# Altium footprint library Altium_Lib_Haris.PcbLib: 85 footprints (part 5 of 6)
Each footprint in its own frame and in the unit in brackets; x right, y up, seen from the top. Pads: shape width x height; smd on the part's side, far side on the other; paste and mask are expansions set on the pad; w line width, h text height; cw(c..) or ccw(c..) is an arc to the next point about the centre after c.
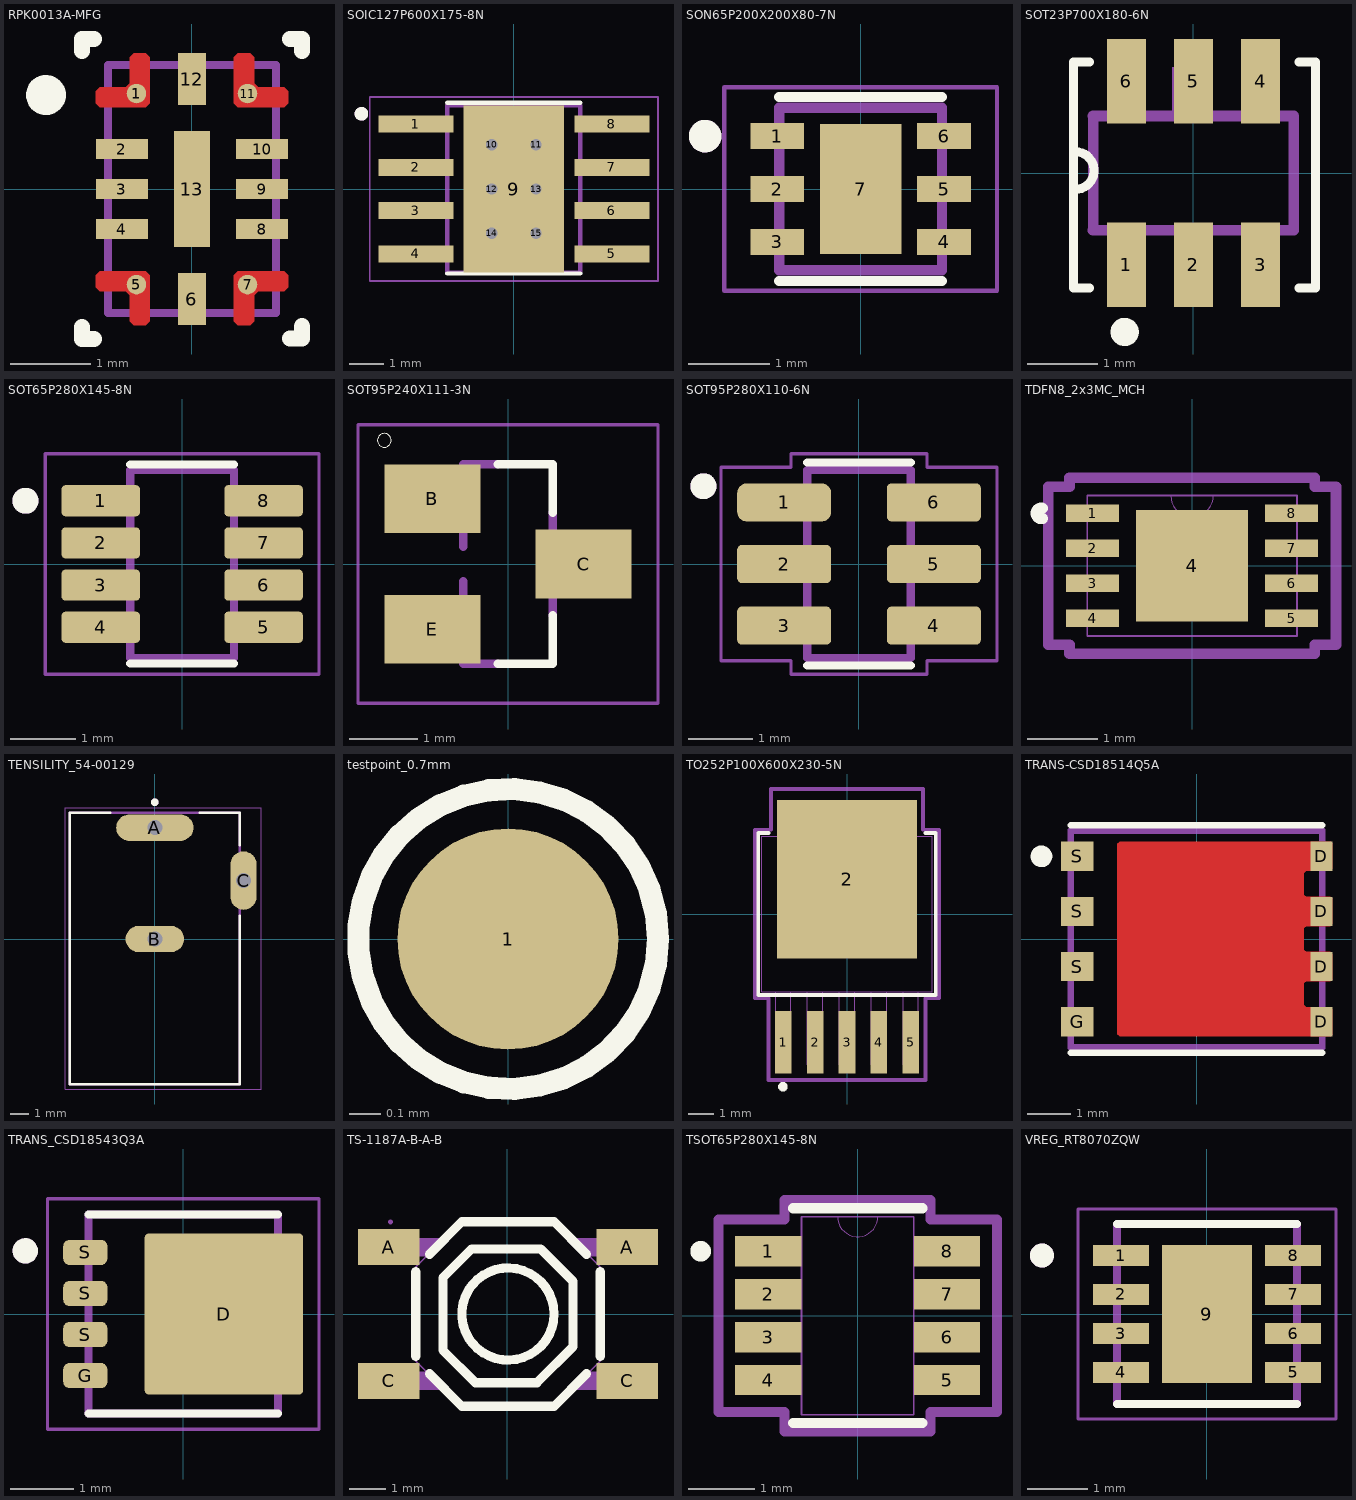
[diagram p4: the footprints below, top view; thin cyan lines are the x and y axes]

## RPK0013A-MFG [mm]
pads (13):
  round 0.244 smd paste+0 mask+0: 1(-0.694,1.194) 5(-0.694,-1.194) 7(0.694,-1.194) 11(0.694,1.194)
  rect 0.65x0.25 smd paste+0 mask+0: 2(-0.875,0.5) 3(-0.875,0) 4(-0.875,-0.5) 8(0.875,-0.5) 9(0.875,0) 10(0.875,0.5)
  rect 0.35x0.65 smd paste+0 mask+0: 6(0,-1.375) 12(0,1.375)
  rect 0.45x1.45 smd paste+0 mask+0: 13(0,0)
Top Layer:
  region: 0.575,1.7 0.725,1.7 0.775,1.65 0.775,1.325 0.825,1.275 1.15,1.275 1.2,1.225 1.2,1.075 1.15,1.025 0.575,1.025 0.525,1.075 0.525,1.65
  region: -0.575,-1.7 -0.725,-1.7 -0.775,-1.65 -0.775,-1.325 -0.825,-1.275 -1.15,-1.275 -1.2,-1.225 -1.2,-1.075 -1.15,-1.025 -0.575,-1.025 -0.525,-1.075 -0.525,-1.65
  region: 1.2,-1.075 1.2,-1.225 1.15,-1.275 0.825,-1.275 0.775,-1.325 0.775,-1.65 0.725,-1.7 0.575,-1.7 0.525,-1.65 0.525,-1.075 0.575,-1.025 1.15,-1.025
  region: -1.2,1.075 -1.2,1.225 -1.15,1.275 -0.825,1.275 -0.775,1.325 -0.775,1.65 -0.725,1.7 -0.575,1.7 -0.525,1.65 -0.525,1.075 -0.575,1.025 -1.15,1.025
Top Overlay:
  circle w0.25: c-1.825,1.175 r0.125
  lines w0.2: -1.373,-1.724 -1.373,-1.874 -1.223,-1.874 ; -1.373,1.724 -1.373,1.874 -1.223,1.874 ; 1.225,-1.865 1.375,-1.865 1.375,-1.715 ; 1.225,1.875 1.375,1.875 1.375,1.725
Top Paste:
  region: 0.575,1.7 0.725,1.7 0.775,1.65 0.775,1.325 0.825,1.275 1.15,1.275 1.2,1.225 1.2,1.075 1.15,1.025 0.575,1.025 0.525,1.075 0.525,1.65
  region: -0.575,-1.7 -0.725,-1.7 -0.775,-1.65 -0.775,-1.325 -0.825,-1.275 -1.15,-1.275 -1.2,-1.225 -1.2,-1.075 -1.15,-1.025 -0.575,-1.025 -0.525,-1.075 -0.525,-1.65
  region: 1.2,-1.075 1.2,-1.225 1.15,-1.275 0.825,-1.275 0.775,-1.325 0.775,-1.65 0.725,-1.7 0.575,-1.7 0.525,-1.65 0.525,-1.075 0.575,-1.025 1.15,-1.025
  region: -1.2,1.075 -1.2,1.225 -1.15,1.275 -0.825,1.275 -0.775,1.325 -0.775,1.65 -0.725,1.7 -0.575,1.7 -0.525,1.65 -0.525,1.075 -0.575,1.025 -1.15,1.025
Top Solder:
  region: 0.575,1.7 0.725,1.7 0.775,1.65 0.775,1.325 0.825,1.275 1.15,1.275 1.2,1.225 1.2,1.075 1.15,1.025 0.575,1.025 0.525,1.075 0.525,1.65
  region: -0.575,-1.7 -0.725,-1.7 -0.775,-1.65 -0.775,-1.325 -0.825,-1.275 -1.15,-1.275 -1.2,-1.225 -1.2,-1.075 -1.15,-1.025 -0.575,-1.025 -0.525,-1.075 -0.525,-1.65
  region: 1.2,-1.075 1.2,-1.225 1.15,-1.275 0.825,-1.275 0.775,-1.325 0.775,-1.65 0.725,-1.7 0.575,-1.7 0.525,-1.65 0.525,-1.075 0.575,-1.025 1.15,-1.025
  region: -1.2,1.075 -1.2,1.225 -1.15,1.275 -0.825,1.275 -0.775,1.325 -0.775,1.65 -0.725,1.7 -0.575,1.7 -0.525,1.65 -0.525,1.075 -0.575,1.025 -1.15,1.025
Mechanical 13:
  lines w0.1: -1.05,-1.55 1.05,-1.55 1.05,1.55 -1.05,1.55 -1.05,-1.55
3D body "RPK0013A.stp": height 0.65, standoff 0, extent -1,-1.5 1,1.5

## SOIC127P600X175-8N [mm]
height 1.7
pads (15):
  rect 2.2x0.5 smd paste-0.025 mask+0.07: 1(-2.875,1.905) 2(-2.875,0.635) 3(-2.875,-0.635) 4(-2.875,-1.905) 8(2.875,1.905)
  rect 2.2x0.5 smd mask+0.07: 5(2.875,-1.905) 6(2.875,-0.635)
  rect 2.2x0.5 smd paste+0 mask+0.07: 7(2.875,0.635)
  rect 2.95x4.9 smd paste-3 mask+0: 9(0,0)
  round 0.43 hole 0.33 mask+0: 10(-0.65,1.3) 11(0.65,1.3) 12(-0.65,0) 13(0.65,0) 14(-0.65,-1.3) 15(0.65,-1.3)
Top Overlay:
  circle w0.2: c-4.47,2.205 r0.1
  lines w0.127: -1.95,-2.475 1.95,-2.475 ; -1.95,2.525 1.95,2.525
Top Paste:
  region: 1.2,-1.55 -1.2,-1.55 -1.2,1.55 1.2,1.55
Top Solder:
  region: 1.2,-1.55 -1.2,-1.55 -1.2,1.55 1.2,1.55
Mechanical 13:
  circle w0.2: c-4.47,2.205 r0.1
  lines w0.127: -1.95,-2.45 1.95,-2.45 1.95,2.45 -1.95,2.45 -1.95,-2.45
Mechanical 15:
  lines w0.05: -4.225,-2.7 4.225,-2.7 4.225,2.7 -4.225,2.7 -4.225,-2.7
3D body "step_temp.STEP": height 1.7, standoff 0, extent -3,-2.45 3,2.45

## SON65P200X200X80-7N [mm]
pads (7):
  rect 0.66x0.32 smd: 1(-1.025,0.65) 2(-1.025,0) 3(-1.025,-0.65) 4(1.025,-0.65) 5(1.025,0) 6(1.025,0.65)
  rect 1x1.6 smd paste-2: 7(0,0)
Top Overlay:
  circle w0.2: c-1.91,0.65 r0.1
  lines w0.127: -1,-1.13 1,-1.13 ; -1,1.13 1,1.13
Top Paste:
  region: 0.316,-0.506 -0.316,-0.506 -0.316,0.506 0.316,0.506
Mechanical 13:
  circle w0.2: c-1.91,0.65 r0.1
  lines w0.127: -1,-1 -1,1 1,1 1,-1 -1,-1
Mechanical 15:
  lines w0.05: -1.675,-1.25 -1.675,1.25 1.675,1.25 1.675,-1.25 -1.675,-1.25
3D body "step_temp.STEP": height 0.8, standoff 0, extent -1,-1 1,1

## SOT23P700X180-6N [mm]
pads (6):
  rect 0.55x1.2 smd: 1(-0.95,-1.3) 2(0,-1.3) 3(0.95,-1.3) 4(0.95,1.3) 5(0,1.3) 6(-0.95,1.3)
Top Overlay:
  circle w0.2: c-0.975,-2.25 r0.1
  lines w0.127: -1.675,-0.231 ccw(c-1.675,0.036) -1.675,0.303 ; -1.474,-1.625 -1.7,-1.625 -1.7,1.575 -1.474,1.575 ; 1.498,-1.625 1.729,-1.625 1.729,1.575 1.498,1.575
Mechanical 13:
  region: 0.2,0.85 -0.3,0.85 -0.3,1.5 0.2,1.5
  region: -0.7,0.85 -1.2,0.85 -1.2,1.5 -0.7,1.5
  region: 1.2,0.85 0.7,0.85 0.7,1.5 1.2,1.5
  region: 1.2,-1.5 0.7,-1.5 0.7,-0.85 1.2,-0.85
  region: 0.25,-1.5 -0.25,-1.5 -0.25,-0.85 0.25,-0.85
  region: -0.7,-1.5 -1.2,-1.5 -1.2,-0.85 -0.7,-0.85
  lines w0.152: -1.422,-0.81 -1.422,0.81 1.422,0.81 1.422,-0.81 -1.422,-0.81
3D body "step_temp.STEP": height 1.45, standoff 0, extent -1.45,-1.4 1.45,1.4

## SOT65P280X145-8N [mm]
pads (8):
  rrect25% 1.21x0.48 smd: 1(-1.255,0.975) 2(-1.255,0.325) 3(-1.255,-0.325) 4(-1.255,-0.975) 5(1.255,-0.975) 6(1.255,-0.325) 7(1.255,0.325) 8(1.255,0.975)
Top Overlay:
  circle w0.2: c-2.415,0.975 r0.1
  lines w0.127: -0.8,-1.535 0.8,-1.535 ; -0.8,1.535 0.8,1.535
Mechanical 13:
  circle w0.2: c-2.415,0.975 r0.1
  lines w0.127: -0.8,-1.45 0.8,-1.45 0.8,1.45 -0.8,1.45 -0.8,-1.45
Mechanical 15:
  lines w0.05: -2.11,-1.7 2.11,-1.7 2.11,1.7 -2.11,1.7 -2.11,-1.7
3D body "step_temp.STEP": height 1.45, standoff 0, extent -1.4,-1.45 1.4,1.45

## SOT95P240X111-3N [mm]
pads (3):
  rect 1.4x1 smd: B(-1.1,0.95) C(1.1,0) E(-1.1,-0.95)
Top Overlay:
  circle w0: c-1.8,1.8 r0.1
  lines w0.127: -0.15,-1.45 0.65,-1.45 0.65,-0.75 ; -0.15,1.45 0.65,1.45 0.65,0.75
Mechanical 13:
  region: 1.296,-0.228 0.711,-0.228 0.711,0.228 1.296,0.228
  region: -0.711,-1.169 -1.296,-1.169 -1.296,-0.711 -0.711,-0.711
  region: -0.713,0.711 -1.296,0.711 -1.296,1.17 -0.713,1.17
  lines w0.127: -0.65,-0.25 -0.65,-1.45 -0.15,-1.45 ; -0.65,0.25 -0.65,1.45 -0.15,1.45 ; 0.65,-0.75 0.65,0.75
Mechanical 15:
  lines w0.051: -2.183,-2.023 -2.183,2.023 2.183,2.023 2.183,-2.023 -2.183,-2.023
3D body "step_temp.STEP": height 1.11, standoff 0, extent -1.2,-1.45 1.2,1.45

## SOT95P280X110-6N [mm]
pads (6):
  rrect50% 1.45x0.59 smd: 1(-1.155,0.95)
  rrect25% 1.45x0.59 smd: 2(-1.155,0) 3(-1.155,-0.95) 4(1.155,-0.95) 5(1.155,0) 6(1.155,0.95)
Top Overlay:
  circle w0.2: c-2.4,1.2 r0.1
  lines w0.127: -0.8,-1.565 0.8,-1.565 ; -0.8,1.565 0.8,1.565
Mechanical 13:
  circle w0.2: c-2.4,1.2 r0.1
  lines w0.127: -0.8,-1.45 0.8,-1.45 0.8,1.45 -0.8,1.45 -0.8,-1.45
Mechanical 15:
  lines w0.05: -2.13,-1.495 -1.05,-1.495 -1.05,-1.7 1.05,-1.7 1.05,-1.495 2.13,-1.495 2.13,1.495 1.05,1.495 1.05,1.7 -1.05,1.7 -1.05,1.495 -2.13,1.495 -2.13,-1.495
3D body "step_temp.STEP": height 1.1, standoff 0, extent -1.4,-1.45 1.4,1.45

## TDFN8_2x3MC_MCH [mil]
pads (9):
  rect 30x10 smd paste+0 mask+0: 1(-56,29.53) 2(-56,9.84) 3(-56,-9.84) 4(-56,-29.53) 5(56,-29.53) 6(56,-9.84) 7(56,9.84) 8(56,29.53)
  rect 63x63 smd paste+0 mask+0: 4(0,0)
Top Overlay:
  lines w6: -84.1,26.62 cw(c-84.84,29.53) -84.1,32.43
Mechanical 13:
  lines w0: -12,39.5 ccw(c0,39.5) 12,39.5
  lines w1: -59,-39.5 -59,39.5 59,39.5 59,-39.5 -59,-39.5
Mechanical 15:
  lines w6: -81,-44.53 -69,-44.53 -69,-49.5 69,-49.5 69,-44.53 81,-44.53 81,44.53 69,44.53 69,49.5 -69,49.5 -69,44.53 -81,44.53 -81,-44.53
3D body "TDFN8_2x3MC_MCH.step": height 30.12, standoff 0, extent -59.02,-39.49 59.02,39.49

## TENSILITY_54-00129 [mm]
height 10.8
pads (3):
  oval 4.1x1.4 hole 0.8 square mask+0.05: A(0,5.9)
  oval 3.1x1.4 hole 0.8 square mask+0.05: B(0,0)
  oval 1.4x3.1 hole 0.8 square mask+0.05: C(4.7,3.1)
Top Overlay:
  circle w0.2: c0,7.25 r0.1
  lines w0.127: -2.37,6.7 -4.5,6.7 -4.5,-7.7 4.5,-7.7 4.5,1.23 ; 2.37,6.7 4.5,6.7 4.5,4.97
Mechanical 13:
  circle w0.2: c0,7.25 r0.1
  lines w0.127: -4.5,-7.7 -4.5,6.7 4.5,6.7 4.5,-7.7 -4.5,-7.7
Mechanical 15:
  lines w0.05: -4.75,-7.95 5.65,-7.95 5.65,6.95 -4.75,6.95 -4.75,-7.95
3D body "step_temp.STEP": height 10.8, standoff -3.7, extent -4.5,-7.7 4.88,6.7

## testpoint_0.7mm [mm]
pads (1):
  round 0.7 smd: 1(0,0)
Top Overlay:
  circle w0.07: c0,0 r0.475

## TO252P100X600X230-5N [mil]
pads (6):
  rect 26x98 smd paste+0 mask+0: 1(-100,-201) 2(-50,-201) 3(0,-201) 4(50,-201) 5(100,-201)
  rect 220x249 smd paste+0 mask+0: 2(0,54.5)
Top Overlay:
  circle w7.87: c-100.39,-270.67 r3.55
  lines w6: -123.1,127 -139,127 -139,-127 139,-127 139,127 123.1,127
Mechanical 13:
  lines w1: -134,-122 -134,122 134,122 134,-122 -134,-122 ; -112,-236 -88,-236 -88,-122 -112,-122 -112,-236 ; -62,-236 -38,-236 -38,-122 -62,-122 -62,-236 ; -12,-236 12,-236 12,-122 -12,-122 -12,-236 ; 38,-236 62,-236 62,-122 38,-122 38,-236 ; 88,-236 112,-236 112,-122 88,-122 88,-236
Mechanical 15:
  lines w6: -144,-132 -123,-132 -123,-260 123,-260 123,-132 144,-132 144,132 119,132 119,196 -119,196 -119,132 -144,132 -144,-132
3D body "PE-TO-252-5-P2-180329_NMD.step": height 103.11, standoff -2.01, extent -134.02,-235.98 134.02,165

## TRANS-CSD18514Q5A [mm]
pads (8):
  rect 0.505x0.675 smd paste+0 mask-0.33: D(2.875,-1.905) D(2.875,-0.635) D(2.875,0.635) D(2.875,1.905)
  rect 0.75x0.675 smd paste+0 mask+0: G(-2.753,-1.905) S(-2.753,-0.635) S(-2.753,0.635) S(-2.753,1.905)
Top Layer:
  region: 3.077,-2.242 -1.773,-2.242 -1.823,-2.193 -1.823,2.193 -1.773,2.242 3.077,2.242 3.127,2.193 3.127,1.617 3.077,1.567 2.522,1.568 2.472,1.518 2.472,1.022 2.522,0.972 3.077,0.972 3.127,0.923 3.127,0.347 3.077,0.298 2.522,0.298 2.472,0.248 2.472,-0.248 2.522,-0.298 3.077,-0.298 3.127,-0.347 3.127,-0.923 3.077,-0.972 2.522,-0.972 2.472,-1.022 2.472,-1.518 2.522,-1.568 3.077,-1.568 3.127,-1.617 3.127,-2.193
Top Overlay:
  circle w0.25: c-3.575,1.905 r0.125
  lines w0.15: -2.9,-2.625 2.9,-2.625 ; -2.9,2.625 2.9,2.625
Top Paste:
  region: -0.927,-1.24 -0.877,-1.29 -0.877,-2.13 -0.927,-2.18 -1.727,-2.18 -1.777,-2.13 -1.777,-1.29 -1.727,-1.24
  region: -1.777,-0.99 -1.777,-0.15 -1.727,-0.1 -0.927,-0.1 -0.877,-0.15 -0.877,-0.99 -0.927,-1.04 -1.727,-1.04
  region: -0.877,0.15 -0.927,0.1 -1.727,0.1 -1.777,0.15 -1.777,0.99 -1.727,1.04 -0.927,1.04 -0.877,0.99
  region: -1.727,1.24 -1.777,1.29 -1.777,2.13 -1.727,2.18 -0.927,2.18 -0.877,2.13 -0.877,1.29 -0.927,1.24
  region: -0.627,-2.18 -0.677,-2.13 -0.677,-1.29 -0.627,-1.24 0.173,-1.24 0.223,-1.29 0.223,-2.13 0.173,-2.18
  region: 0.223,-0.99 0.173,-1.04 -0.627,-1.04 -0.677,-0.99 -0.677,-0.15 -0.627,-0.1 0.173,-0.1 0.223,-0.15
  region: 0.173,1.04 0.223,0.99 0.223,0.15 0.173,0.1 -0.627,0.1 -0.677,0.15 -0.677,0.99 -0.627,1.04
  region: 0.173,2.18 0.223,2.13 0.223,1.29 0.173,1.24 -0.627,1.24 -0.677,1.29 -0.677,2.13 -0.627,2.18
  region: 2.373,-1.24 2.423,-1.29 2.423,-2.13 2.373,-2.18 1.573,-2.18 1.523,-2.13 1.523,-1.29 1.573,-1.24
  region: 1.523,-0.15 1.573,-0.1 2.373,-0.1 2.423,-0.15 2.423,-0.99 2.373,-1.04 1.573,-1.04 1.523,-0.99
  region: 2.423,0.99 2.423,0.15 2.373,0.1 1.573,0.1 1.523,0.15 1.523,0.99 1.573,1.04 2.373,1.04
  region: 1.573,2.18 2.373,2.18 2.423,2.13 2.423,1.29 2.373,1.24 1.573,1.24 1.523,1.29 1.523,2.13
  region: 1.273,-1.24 1.323,-1.29 1.323,-2.13 1.273,-2.18 0.473,-2.18 0.423,-2.13 0.423,-1.29 0.473,-1.24
  region: 0.423,-0.99 0.423,-0.15 0.473,-0.1 1.273,-0.1 1.323,-0.15 1.323,-0.99 1.273,-1.04 0.473,-1.04
  region: 1.273,1.04 1.323,0.99 1.323,0.15 1.273,0.1 0.473,0.1 0.423,0.15 0.423,0.99 0.473,1.04
  region: 1.273,2.18 1.323,2.13 1.323,1.29 1.273,1.24 0.473,1.24 0.423,1.29 0.423,2.13 0.473,2.18
Top Solder:
  region: 3.077,-2.242 -1.773,-2.242 -1.823,-2.193 -1.823,2.193 -1.773,2.242 3.077,2.242 3.127,2.193 3.127,1.617 3.077,1.567 2.522,1.568 2.472,1.518 2.472,1.022 2.522,0.972 3.077,0.972 3.127,0.923 3.127,0.347 3.077,0.298 2.522,0.298 2.472,0.248 2.472,-0.248 2.522,-0.298 3.077,-0.298 3.127,-0.347 3.127,-0.923 3.077,-0.972 2.522,-0.972 2.472,-1.022 2.472,-1.518 2.522,-1.568 3.077,-1.568 3.127,-1.617 3.127,-2.193
Mechanical 13:
  lines w0.15: -2.9,-2.5 -2.9,2.5 2.9,2.5 2.9,-2.5 -2.9,-2.5
3D body "CSD18514Q5A.STEP": height 1.11, standoff 0.01, extent -2.975,-2.45 3.025,2.45

## TRANS_CSD18543Q3A [mm]
pads (5):
  rrect5% 2.51x2.55 smd paste-2 mask+0: D(0.645,0)
  rrect50% 0.7x0.4 smd paste-1 mask+0: G(-1.55,-0.975) S(-1.55,-0.325) S(-1.55,0.325) S(-1.55,0.975)
Top Overlay:
  circle w0.2: c-2.5,1 r0.1
  lines w0.127: -1.5,-1.575 1.5,-1.575 ; -1.5,1.575 1.5,1.575
Top Paste:
  drawing of 12 lines, arcs and shapes, not listed
Top Solder:
  drawing of 5 lines, arcs and shapes, not listed
Mechanical 13:
  circle w0.2: c-2.5,1 r0.1
  lines w0.127: -1.5,-1.575 1.5,-1.575 1.5,1.575 -1.5,1.575 -1.5,-1.575
Mechanical 15:
  lines w0.05: -2.15,-1.825 2.15,-1.825 2.15,1.825 -2.15,1.825 -2.15,-1.825
3D body "step_temp.STEP": height 0.9, standoff 0, extent -1.65,-1.725 1.65,1.725

## TS-1187A-B-A-B [mm]
pads (4):
  rect 1.7x1 smd paste+0 mask+0.051: A(-3.275,1.85) A(3.325,1.85) C(-3.275,-1.85) C(3.325,-1.85)
Top Overlay:
  circle w0.254: c0.025,0 r1.275
  lines w0.254: -2.525,-1.168 -2.525,1.169 ; -2.145,-1.655 -1.25,-2.55 1.3,-2.55 2.195,-1.655 ; -2.145,1.655 -1.25,2.55 1.3,2.55 2.195,1.655 ; 2.575,-1.168 2.575,1.169 ; -1.776,-0.998 -0.874,-1.9 0.825,-1.9 1.826,-0.899 1.826,0.899 0.924,1.801 -0.976,1.801 -1.776,1.001 -1.776,-0.998
Mechanical 15:
  region: -3.165,2.55 -3.165,2.575 -3.2,2.61 -3.25,2.61 -3.285,2.575 -3.285,2.55 -3.285,2.525 -3.25,2.49 -3.2,2.49 -3.165,2.525
  region: 2.875,-2.1 2.875,-1.6 3.275,-1.6 3.275,-2.1
  region: 2.225,1.6 1.725,2.1 2.885,2.101 2.885,1.601
  region: 2.875,1.601 2.875,2.101 3.275,2.101 3.275,1.601
  region: -3.225,1.599 -3.225,2.099 -2.825,2.099 -2.825,1.599
  region: -3.225,-2.1 -3.225,-1.6 -2.825,-1.6 -2.825,-2.1
  region: -2.175,-1.6 -1.675,-2.1 -2.835,-2.1 -2.835,-1.6
  region: 2.226,-1.601 1.726,-2.1 2.886,-2.101 2.886,-1.601
  region: -2.175,1.6 -1.675,2.1 -2.835,2.1 -2.835,1.6
  lines w0.051: -2.525,-1.3 -1.275,-2.55 1.325,-2.55 2.575,-1.3 2.575,1.3 1.325,2.55 -1.275,2.55 -2.525,1.3 -2.525,-1.3
3D body "3D_PCB_NEW_PCB_2023-10-23_2023-10-23.step": height 1.56, standoff 0.01, extent -3.125,-2.625 3.275,2.576

## TSOT65P280X145-8N [mil]
pads (8):
  rect 39.5x18 smd: 1(-53.25,38.39) 2(-53.25,12.8) 3(-53.25,-12.8) 4(-53.25,-38.39) 5(53.25,-38.39) 6(53.25,-12.8) 7(53.25,12.8) 8(53.25,38.39)
Top Overlay:
  circle w7.87: c-93.5,38.39 r2.2
  lines w6: -38.5,-64 38.5,-64 ; -38.5,64 38.5,64
Mechanical 13:
  lines w0: -12,59 ccw(c0,59) 12,59
  lines w1: -59,-46.39 -33.5,-46.39 -33.5,-30.39 -59,-30.39 -59,-46.39 ; -59,-20.8 -33.5,-20.8 -33.5,-4.8 -59,-4.8 -59,-20.8 ; -59,4.8 -33.5,4.8 -33.5,20.8 -59,20.8 -59,4.8 ; -59,30.39 -33.5,30.39 -33.5,46.39 -59,46.39 -59,30.39 ; -33.5,-59 -33.5,59 33.5,59 33.5,-59 -33.5,-59 ; 33.5,-46.39 59,-46.39 59,-30.39 33.5,-30.39 33.5,-46.39 ; 33.5,-20.8 59,-20.8 59,-4.8 33.5,-4.8 33.5,-20.8 ; 33.5,4.8 59,4.8 59,20.8 33.5,20.8 33.5,4.8 ; 33.5,30.39 59,30.39 59,46.39 33.5,46.39 33.5,30.39
Mechanical 15:
  lines w6: -83,-57.39 -43.5,-57.39 -43.5,-69 43.5,-69 43.5,-57.39 83,-57.39 83,57.39 43.5,57.39 43.5,69 -43.5,69 -43.5,57.39 -83,57.39 -83,-57.39
3D body "TSOT23-8_MP2236C_MNP.step": height 39.09, standoff 0, extent -59.02,-59.02 59.02,59.02

## VREG_RT8070ZQW [mm]
pads (9):
  rect 0.93x0.35 smd paste+0 mask+0.102: 1(-1.435,0.975) 2(-1.435,0.325) 3(-1.435,-0.325) 4(-1.435,-0.975) 5(1.435,-0.975) 6(1.435,-0.325) 7(1.435,0.325) 8(1.435,0.975)
  rect 1.5x2.3 smd paste-2 mask+0.102: 9(0,0)
Top Overlay:
  circle w0.2: c-2.75,0.975 r0.1
  lines w0.127: -1.5,-1.5 1.5,-1.5 ; -1.5,1.5 1.5,1.5
Top Paste:
  region: 0.474,-0.727 -0.474,-0.727 -0.474,0.727 0.474,0.727
Mechanical 13:
  circle w0.2: c-2.75,0.975 r0.1
  lines w0.127: -1.5,-1.5 1.5,-1.5 1.5,1.5 -1.5,1.5 -1.5,-1.5
Mechanical 15:
  lines w0.05: -2.15,-1.75 2.15,-1.75 2.15,1.75 -2.15,1.75 -2.15,-1.75